# Altium schematic symbol library CONN - BOOMELE 2.54-1x14.SchLib: 1 symbol
Pins are listed as number, name and electrical type; pins without a type are passive.

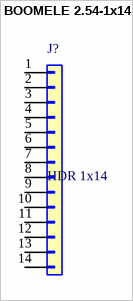
[diagram p0: symbol BOOMELE 2.54-1x14]

## BOOMELE 2.54-1x14
designator J?, comment HDR 1x14
CONN HEADER 40POS 2.54mm SINGLE ROW TH (tira 1x40 cortada a 1x14); Manufacturer: BOOMELE(Boom Precision Elec); Manufacturer Part Number: 2.54-1*40P; Supplier 1: LCSC; Supplier Part Number 1: C2337; Category: Headers, Male Pins; Case/Package: Through Hole, P=2.54mm; Operating Temperature: -55°C ~ 105°C; Lifecycle Status: Active; ComponentLink1Description: Datasheet; ComponentLink1URL: https://www.lcsc.com/datasheet/C2337.pdf; ComponentLink2Description: LCSC; ComponentLink2URL: https://www.lcsc.com/product-detail/C2337.html; Nota DigiKey: No disponible en DigiKey: estandar del ramo (tira BOOMELE)
footprint HDR 1x14 2.54 - BOOMELE (Huella HDR 1x14 2.54 - BOOMELE)
pins: 1 Pin_1, 2 Pin_2, 3 Pin_3, 4 Pin_4, 5 Pin_5, 6 Pin_6, 7 Pin_7, 8 Pin_8, 9 Pin_9, 10 Pin_10, 11 Pin_11, 12 Pin_12, 13 Pin_13, 14 Pin_14